# Altium schematic symbol library TLV7031QDBVRQ1.SchLib: 1 symbol
Pins are listed as number, name and electrical type; pins without a type are passive.

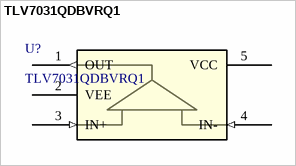
[diagram p0: symbol TLV7031QDBVRQ1]

## TLV7031QDBVRQ1
designator U?
Automotive nano power comparator with push-pull output 5-SOT-23 -40 to 125; Manufacturer_Name: Texas Instruments; Copyright: Copyright (C) 2026 Ultra Librarian. All rights reserved.; Manufacturer_Part_Number: TLV7031QDBVRQ1; Datasheet: https://www.ti.com/lit/gpn/tlv7031-q1; RefDes: RefDes; Type: Type
footprint SOT_DBVRQ1_TEX
pins: 1 OUT (out), 2 VEE (power), 3 IN+ (in), 4 IN- (in), 5 VCC (power)